# EAGLE library part HDR-1X12 (library rtd2660_board)
1 x 12 pin header 2.54 mm
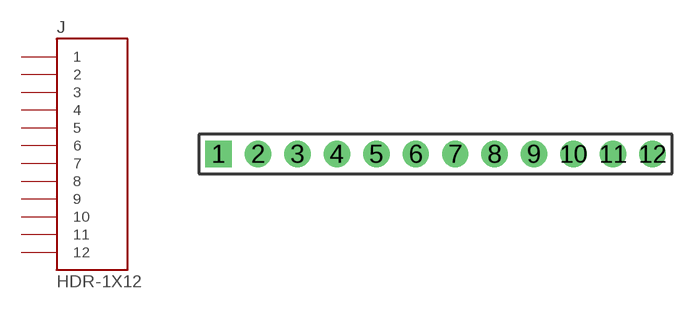
[diagram p2: symbol with the pads of HDR1X12-2.54; footprint HDR1X12-2.54]

Designator prefix J

## HDR-1X12  [HDR1X12-2.54]
1  1  pas
2  2  pas
3  3  pas
4  4  pas
5  5  pas
6  6  pas
7  7  pas
8  8  pas
9  9  pas
10  10  pas
11  11  pas
12  12  pas

## Footprint HDR1X12-2.54 (pad centres in mm)
1 x 12 pin header, 2.54 mm pitch
drill 1 pad 1.7 square: 1 0,0
drill 1 pad 1.7 round: 2 2.54,0; 3 5.08,0; 4 7.62,0; 5 10.16,0; 6 12.7,0; 7 15.24,0; 8 17.78,0; 9 20.32,0; 10 22.86,0; 11 25.4,0; 12 27.94,0